# Altium footprint library FootPrintLib_10.PcbLib: 270 footprints (part 5 of 17)
Each footprint in its own frame and in the unit in brackets; x right, y up, seen from the top. Pads: shape width x height; smd on the part's side, far side on the other; paste and mask are expansions set on the pad; w line width, h text height; cw(c..) or ccw(c..) is an arc to the next point about the centre after c.
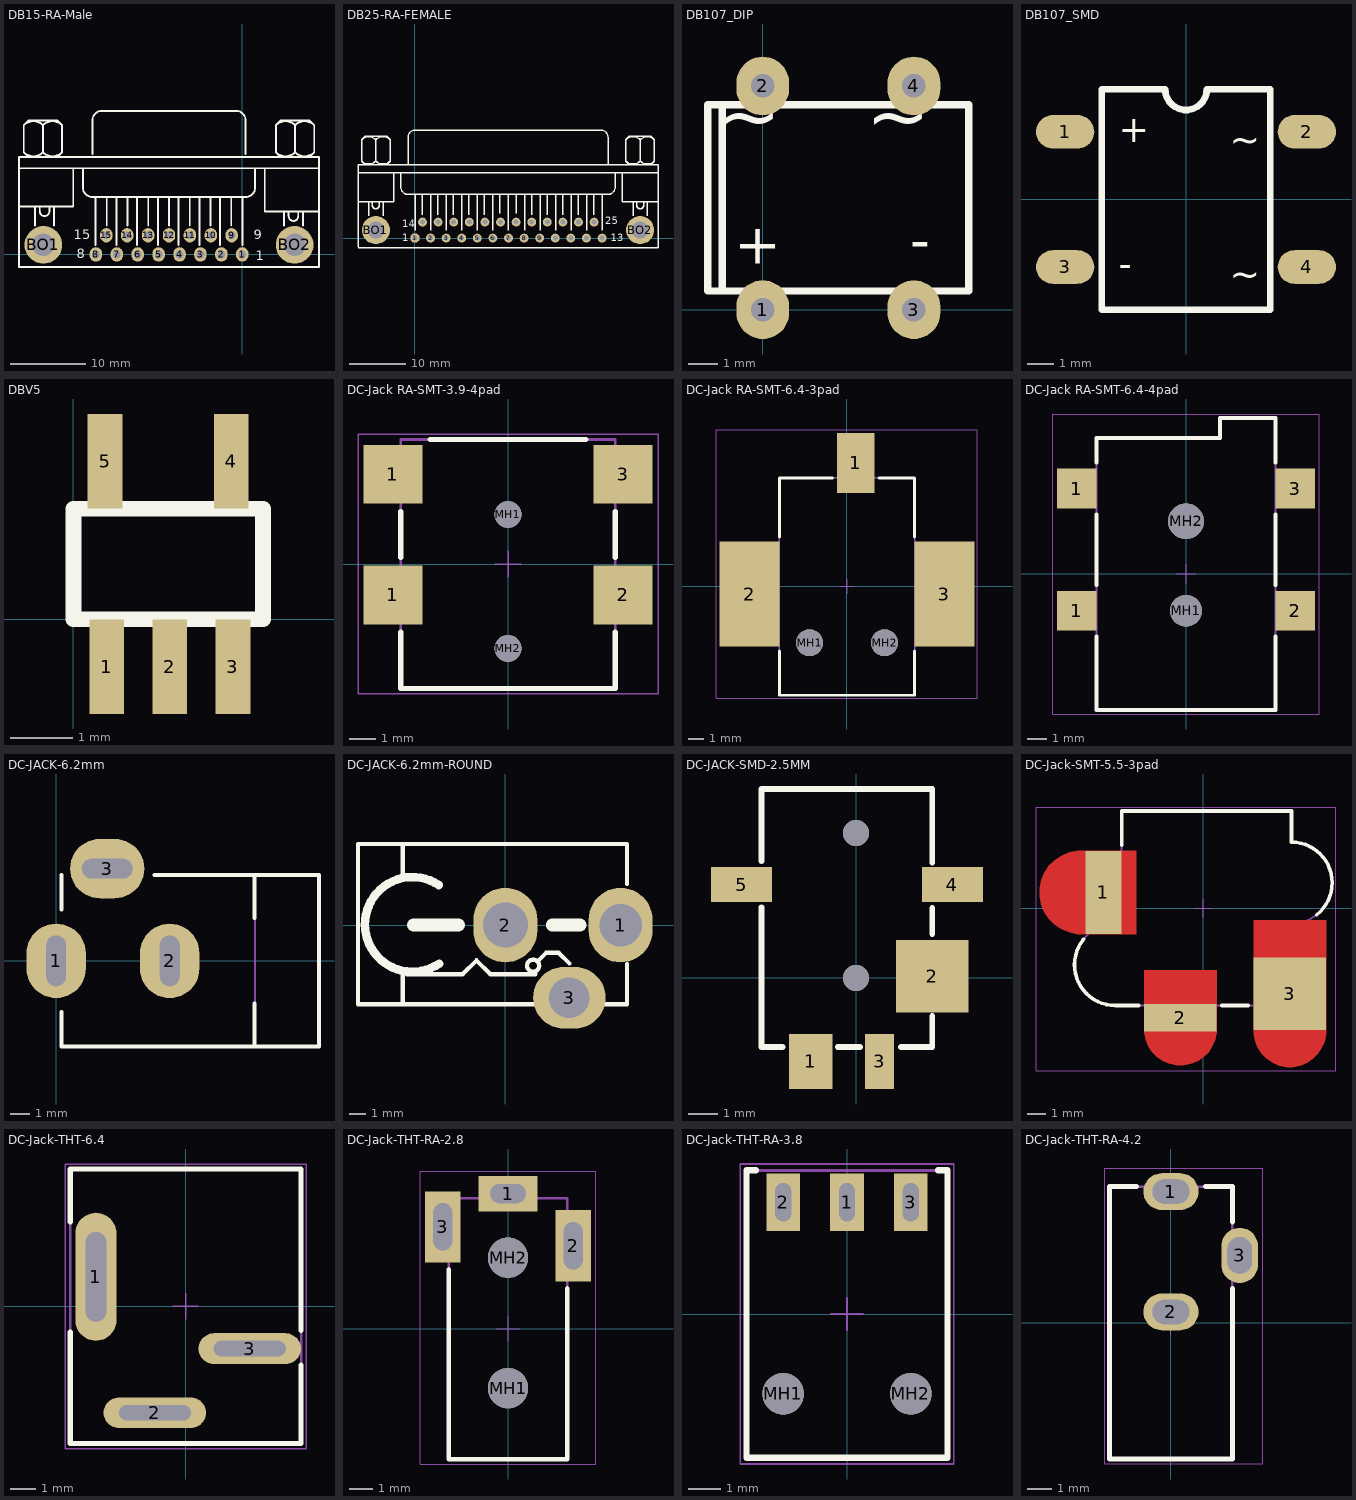
[diagram p4: the footprints below, top view; thin cyan lines are the x and y axes]

## DB15-RA-Male [mil]
pads (17):
  oval 65x75 hole 40: 1(0,0) 2(-109.17,0) 3(-218.33,0) 4(-327.5,0) 5(-436.67,0) 6(-545.83,0) 7(-655,0) 8(-764.17,0) 9(-55,100) 10(-164.17,100) 11(-273.33,100) 12(-382.5,100) 13(-491.67,100) 14(-600.83,100) 15(-710,100)
  round 196.67 hole 118.33: BO1(-1038.33,50) BO2(273.33,50)
Top Overlay:
  lines w10: -1165.83,450 400.83,450 ; -1157.5,250 -882.5,250 -882.5,450 ; -1140.92,533.25 ccw(c-1090.83,583.33) -1040.75,533.25 ; -1140.92,675.09 cw(c-1090.83,625) -1040.75,675.09 ; -1115.83,508.33 -1140.83,533.33 -1140.83,675 -1115.83,700 -965.83,700 -940.83,675 -940.83,533.33 -965.83,508.33 ; -1082.5,150 -1082.5,250 ; -1057.5,250 -1057.5,225 ccw(c-1032.5,225) -1007.5,225 -1007.5,250 ; -1040.92,533.25 ccw(c-990.83,583.33) -940.75,533.25 ; -1040.92,675.09 cw(c-990.83,625) -940.75,675.09 ; -1040.83,533.33 -1040.83,675 ; -982.5,150 -982.5,250 ; -832.5,450 -832.5,350 ccw(c-782.5,350) -782.5,300 17.5,300 ccw(c17.5,350) 67.5,350 67.5,450 ; -782.5,525 -782.5,700 cw(c-732.5,700) -732.5,750 -32.5,750 cw(c-32.5,700) 17.5,700 17.5,525 ; -765.83,50 -765.83,300 ; -707.5,150 -707.5,300 ; -657.5,50 -657.5,300 ; -599.17,150 -599.17,300 ; -549.17,50 -549.17,300 ; -490.83,150 -490.83,300 ; -440.83,50 -440.83,300 ; -382.5,150 -382.5,300 ; -332.5,50 -332.5,300 ; -274.17,150 -274.17,300 ; -224.17,50 -224.17,300 ; -165.83,150 -165.83,300 ; -115.83,50 -115.83,300 ; -57.5,150 -57.5,300 ; 0.83,50 0.83,291.67 ; 117.5,450 117.5,225 392.5,225 ; 175.75,533.25 ccw(c225.83,583.33) 275.92,533.25 ; 175.75,675.09 cw(c225.83,625) 275.92,675.09 ; 200.83,508.33 175.83,533.33 175.83,675 200.83,700 350.83,700 375.83,675 375.83,533.33 350.83,508.33 ; 217.5,150 217.5,225 ; 242.5,225 242.5,200 ccw(c267.5,200) 292.5,200 292.5,225 ; 275.75,533.25 ccw(c325.83,583.33) 375.92,533.25 ; 275.75,675.09 cw(c325.83,625) 375.92,675.09 ; 275.83,533.33 275.83,675 ; 317.5,150 317.5,225 ; -1165.83,-66.67 400.83,-66.67 400.83,508.33 -1165.83,508.33 -1165.83,-66.67
  text "1" at 70,-30 h50
  text "9" at 60,80 h50
  text "15" at -880,80 h50
  text "8" at -865,-20 h50

## DB25-RA-FEMALE [mil]
pads (27):
  oct 62x62 hole 35: 1(0,0)
  round 62 hole 35: 2(109.17,0) 3(218.33,0) 4(327.5,0) 5(436.67,0) 6(545.83,0) 7(655,0) 8(764.17,0) 9(873.33,0) 10(982.5,0) 11(1091.67,0) 12(1200.83,0) 13(1310,0) 14(53.33,111.67) 15(162.5,111.67) 16(271.67,111.67) 17(380.83,111.67) 18(490,111.67) 19(599.17,111.67) 20(708.33,111.67) 21(817.5,111.67) 22(926.67,111.67) 23(1035.83,111.67) 24(1145,111.67) 25(1254.17,111.67)
  round 196.67 hole 118.33: BO1(-273.33,55.83) BO2(1576.67,55.83)
Top Overlay:
  lines w10: -398.33,-69.17 1701.67,-69.17 1701.67,514.17 -398.33,514.17 -398.33,-60.83 ; -398.33,255.83 -148.33,255.83 -148.33,455.83 ; -398.33,455.83 1701.67,455.83 ; -373.42,539.08 ccw(c-323.33,589.17) -273.25,539.08 ; -373.42,689.25 cw(c-323.33,639.17) -273.25,689.25 ; -348.33,514.17 -373.33,539.17 -373.33,689.17 -348.33,714.17 -198.33,714.17 -173.33,689.17 -173.33,539.17 -198.33,514.17 ; -323.33,155.83 -323.33,255.83 ; -298.33,255.83 -298.33,230.83 ccw(c-273.33,230.83) -248.33,230.83 -248.33,255.83 ; -273.42,539.08 ccw(c-223.33,589.17) -173.25,539.08 ; -273.42,689.25 cw(c-223.33,639.17) -173.25,689.25 ; -273.33,539.17 -273.33,689.17 ; -223.33,155.83 -223.33,255.83 ; -98.33,455.83 -98.33,355.83 ccw(c-48.33,355.83) -48.33,305.83 1351.67,305.83 ccw(c1351.67,355.83) 1401.67,355.83 1401.67,455.83 ; -48.33,514.17 -48.33,705.83 cw(c1.67,705.83) 1.67,755.83 1276.67,755.83 1301.67,755.83 cw(c1301.67,705.83) 1351.67,705.83 1351.67,514.17 ; 1.67,55.83 1.67,305.83 ; 51.67,164.17 51.67,305.83 ; 110,55.83 110,305.83 ; 160,164.17 160,305.83 ; 218.33,55.83 218.33,305.83 ; 268.33,164.17 268.33,305.83 ; 326.67,55.83 326.67,305.83 ; 376.67,164.17 376.67,305.83 ; 435,55.83 435,305.83 ; 485,164.17 485,305.83 ; 543.33,55.83 543.33,305.83 ; 593.33,172.5 593.33,305.83 ; 651.67,55.83 651.67,305.83 ; 710,172.5 710,305.83 ; 768.33,55.83 768.33,305.83 ; 818.33,164.17 818.33,305.83 ; 876.67,55.83 876.67,305.83 ; 926.67,164.17 926.67,305.83 ; 985,55.83 985,305.83 ; 1035,164.17 1035,305.83 ; 1093.33,55.83 1093.33,305.83 ; 1143.33,164.17 1143.33,305.83 ; 1201.67,55.83 1201.67,305.83 ; 1251.67,164.17 1251.67,305.83 ; 1310,55.83 1310,305.83 ; 1451.67,455.83 1451.67,255.83 1701.67,255.83 ; 1476.58,539.08 ccw(c1526.67,589.17) 1576.75,539.08 ; 1476.58,689.25 cw(c1526.67,639.17) 1576.75,689.25 ; 1501.67,514.17 1476.67,539.17 1476.67,689.17 1501.67,714.17 1651.67,714.17 1676.67,689.17 1676.67,539.17 1651.67,514.17 ; 1526.67,155.83 1526.67,255.83 ; 1551.67,255.83 1551.67,230.83 ccw(c1576.67,230.83) 1601.67,230.83 1601.67,255.83 ; 1576.58,539.08 ccw(c1626.67,589.17) 1676.75,539.08 ; 1576.58,689.25 cw(c1626.67,639.17) 1676.75,689.25 ; 1576.67,539.17 1576.67,689.17 ; 1626.67,155.83 1626.67,255.83
  text "14" at -88.33,75.83 h50
  text "1" at -88.33,-24.17 h50
  text "13" at 1371.67,-24.17 h50
  text "25" at 1331.67,95.83 h50

## DB107_DIP [mm]
pads (4):
  oval 1.8x2 hole 0.8: 1(0,0) 2(0,7.62) 3(5.15,0) 4(5.15,7.62)
Top Overlay:
  lines w0.254: -1.385,0.635 -1.385,6.985 ; -1.87,0.635 -1.87,6.985 7.02,6.985 7.02,0.635 -1.87,0.635
  text "~" at 5.705,7.315 h1.91
  text "~" at 0.625,7.315 h1.91
  text "-" at 5.714,2.743 h1.4
  text "+" at 0.634,2.743 h1.4

## DB107_SMD [mm] "Bridge Rectifier"
height 2.55
pads (4):
  oval 2.2x1.27 smd: 1(-4.56,2.55) 2(4.56,2.55) 3(-4.56,-2.55) 4(4.56,-2.55)
Top Overlay:
  lines w0.254: -3.175,-4.16 3.175,-4.16 3.175,4.16 0.786,4.16 cw(c0,4.16) -0.786,4.16 -3.175,4.16 -3.175,-4.16
  text "+" at -2.54,2.159 h1
  text "-" at -2.54,-2.921 h1
  text "~" at 1.651,-3.302 h1
  text "~" at 1.651,1.778 h1

## DBV5 [mil]
pads (5):
  rect 22x60 smd: 1(21,-30) 2(61,-30) 3(101,-30) 4(100,100) 5(20,100)
Top Overlay:
  lines w10: 0,0 0,70 120,70 120,0 0,0

## DC-Jack RA-SMT-3.9-4pad [mm] "DC Power Jack Right Angled Low Profile SMT 3.9"
height 5.3
pads (6):
  rect 2.2x2.2 smd: 1(-4.3,-1.15) 1(-4.3,3.35) 2(4.3,-1.15) 3(4.3,3.35)
  round 1 hole 1 unplated: MH1(0,1.85) MH2(0,-3.15)
Top Overlay:
  lines w0.2: -4,-2.55 -4,-4.65 4,-4.65 4,-2.55 ; -4,0.25 -4,1.95 ; -2.9,4.65 2.9,4.65 ; 4,0.25 4,1.95
Mechanical 13:
  lines w0.1: -4,-1.95 -4.9,-1.95 -4.9,-0.35 -4,-0.35 ; -4,2.55 -4.9,2.55 -4.9,4.15 -4,4.15 ; 4,-1.95 4.9,-1.95 4.9,-0.35 4,-0.35 ; 4,2.55 4.9,2.55 4.9,4.15 4,4.15 ; -4,-4.65 4,-4.65 4,4.65 -4,4.65 -4,-4.65
Mechanical 15:
  lines w0.05: -0.5,0 0.5,0 ; 0,-0.5 0,0.5 ; -5.6,-4.85 5.6,-4.85 5.6,4.85 -5.6,4.85 -5.6,-4.85
3D body "694102107102.stp": height 5.32, standoff -0.78, extent -4.9,-4.65 4.9,4.65

## DC-Jack RA-SMT-6.4-3pad [mm] "DC Power Jack Right Angled SMT 6.4 with 3 soldering pad"
height 11
pads (5):
  rect 2.5x4 smd: 1(0.6,8.25)
  rect 4x7 smd: 2(-6.5,-0.5) 3(6.5,-0.5)
  round 1.8 hole 1.8 unplated: MH1(-2.5,-3.75) MH2(2.5,-3.75)
Top Overlay:
  lines w0.2: -4.5,-4.3 -4.5,-7.25 4.5,-7.25 4.5,-4.3 ; -4.5,3.3 -4.5,7.25 -0.95,7.25 ; 2.15,7.25 4.5,7.25 4.5,3.3
Mechanical 13:
  lines w0.1: -4.5,-2.8 -7.6,-2.8 -7.6,1.8 -4.5,1.8 ; -0.3,7.25 -0.3,9.75 1.5,9.75 1.5,7.25 ; 4.5,-2.8 7.6,-2.8 7.6,1.8 4.5,1.8 ; -4.5,-7.25 -4.5,7.25 4.5,7.25 4.5,-7.25 -4.5,-7.25
Mechanical 15:
  lines w0.05: -0.5,0 0.5,0 ; 0,-0.5 0,0.5 ; -8.7,-7.45 -8.7,10.45 8.7,10.45 8.7,-7.45 -8.7,-7.45
3D body "694106105102.stp": height 11.05, standoff -1.95, extent -7.6,-7.25 7.6,9.75

## DC-Jack RA-SMT-6.4-4pad [mm] "DC Power Jack Right Angled SMT ?6.4 with 4 soldering pads & pegs"
height 11
pads (6):
  rect 2x2 smd: 1(-5.5,-1.85) 1(-5.5,4.3) 2(5.5,-1.85) 3(5.5,4.3)
  round 1.6 hole 1.6 unplated: MH1(0,-1.85)
  round 1.8 hole 1.8 unplated: MH2(0,2.65)
Top Overlay:
  lines w0.2: -4.5,-3.15 -4.5,-6.85 4.5,-6.85 4.5,-3.15 ; -4.5,-0.55 -4.5,3 ; -4.5,5.6 -4.5,6.85 1.7,6.85 1.7,7.85 4.5,7.85 4.5,5.6 ; 4.5,-0.55 4.5,3
Mechanical 13:
  lines w0.1: -4.5,-2.6 -6.25,-2.6 -6.25,-1.1 -4.5,-1.1 ; -4.5,3.55 -6.25,3.55 -6.25,5.05 -4.5,5.05 ; 4.5,-2.6 6.25,-2.6 6.25,-1.1 4.5,-1.1 ; 4.5,3.55 6.25,3.55 6.25,5.05 4.5,5.05 ; -4.5,-6.85 -4.5,6.85 1.7,6.85 1.7,7.85 4.5,7.85 4.5,-6.85 -4.5,-6.85
Mechanical 15:
  lines w0.05: -0.5,0 0.5,0 ; 0,-0.5 0,0.5 ; -6.7,-7.05 -6.7,8.05 6.7,8.05 6.7,-7.05 -6.7,-7.05
3D body "694106106102.stp": height 11.05, standoff -1.15, extent -6.25,-6.85 6.25,7.85

## DC-JACK-6.2mm [mil] "DC-JACK-6.2mm"
pads (3):
  oval 120x150 hole 39.37 slot 102 at 90 deg: 1(0,0) 2(229,0)
  oval 150x120 hole 39.37 slot 102 at 0 deg: 3(103,186)
Top Overlay:
  lines w8: 11,-103 11,-173 530,-173 530,173 198,173 ; 11,103 11,173 ; 400,-173 400,-86.5 ; 400,86.5 400,173
Mechanical 13:
  lines w3.94: 401,-173 401,173
  text "PCB Edge" at 420,-145 h9.84
3D body "User Library-DC-JACK-2.5mm-10A.step": height 452.76, standoff -118.11, extent -25.75,-177.16 529.37,200.79

## DC-JACK-6.2mm-ROUND [mil] "µçÔ´²å¿×"
height 393.7
pads (3):
  oval 150x175 hole 100: 1(270,0)
  oval 150x175 hole 105: 2(0,0)
  oval 170x145 hole 95: 3(150,-170)
Top Overlay:
  circle w10: c65,-95 r14.14
  lines w10: -240,-185 -240,-110 ; -240,120 -240,190 ; -230,-115 -100,-115 -67.5,-82.5 -35,-115 70,-115 ; 75,-85 95,-65 125,-65 150,-90 ; 285,-91.25 285,-185 -345,-185 -345,190 285,190 285,96.25
  lines w20: -156.11,94 ccw(c-217.69,1.62) -155,-90
  lines w30: -215,0 -110,0 ; 110,0 175,0
3D body: height 236.22, standoff 0, extent -350,-185 285,190
3D body: height 392.46, standoff 78.74, extent -340.28,-160 250.28,154.34
3D body: height 433.07, standoff 0, extent -350,-185 -235,190

## DC-JACK-SMD-2.5MM [mm] "DC-JACK-SMD-2.5MM"
height 3
pads (5):
  rect 1.5x1.9 smd: 1(-1.565,-2.885)
  rect 2.5x2.5 smd: 2(2.625,0.065)
  rect 1x1.9 smd: 3(0.805,-2.885)
  rect 2.1x1.2 smd: 4(3.321,3.225) 5(-3.956,3.225)
via 0,5 diameter 0.9 hole 0.9
via 0,0 diameter 0.9 hole 0.9
Top Overlay:
  lines w0.203: -3.275,2.44 -3.275,-2.385 -2.54,-2.385 ; -3.275,4.037 -3.275,6.525 2.625,6.525 2.625,3.979 ; -0.635,-2.385 0.127,-2.385 ; 1.552,-2.385 2.625,-2.385 2.625,-1.312 ; 2.625,1.524 2.625,2.413
3D body: height 2, standoff 0, extent 2.667,-0.508 2.921,0.762
3D body: height 0.2, standoff 0, extent 2.921,-0.508 3.556,0.762
3D body: height 2, standoff 0, extent -3.556,2.794 -3.302,3.81
3D body: height 0.2, standoff 0, extent -4.191,2.794 -3.556,3.81
3D body: height 2, standoff 0, extent 2.667,2.794 2.921,3.81
3D body: height 0.2, standoff 0, extent 2.921,2.794 3.556,3.81
3D body: height 2, standoff 0, extent 0.305,-2.667 1.321,-2.413
3D body: height 0.2, standoff 0, extent 0.305,-3.302 1.321,-2.667
3D body: height 0.2, standoff 0, extent -1.905,-3.302 -0.889,-2.667
3D body: height 2, standoff 0, extent -1.905,-2.667 -0.889,-2.413
3D body: height 3, standoff 0, extent -3.302,-2.413 2.667,6.477
3D body: height 2.5, standoff 0, extent -2.764,6.504 -0.274,6.554
3D body: height 1.45, standoff 1.05, extent -1.749,6.502 -1.35,6.602

## DC-Jack-SMT-5.5-3pad [mm] "DC Power Jack Connector Vertical SMT 5.5 with 3 Solder Pads"
height 11
pads (3):
  rect 2x4.6 smd paste-403.566 mask-403.566: 1(-5.5,0.875)
  rect 4x1.5 smd paste-403.566 mask-403.566: 2(-1.25,-6.05)
  rect 4x4 smd paste-403.566 mask-403.566: 3(4.8,-4.725)
Top Layer:
  region: 2.8,-6.775 2.8,-0.675 6.8,-0.675 6.8,-6.775 6.8,-6.972 6.723,-7.358 6.572,-7.722 6.354,-8.05 6.075,-8.328 5.747,-8.547 5.383,-8.698 4.997,-8.775 4.603,-8.775 4.217,-8.698 3.853,-8.547 3.525,-8.328 3.246,-8.05 3.028,-7.722 2.877,-7.358 2.8,-6.972
  region: -3.25,-6.675 -3.25,-6.872 -3.173,-7.258 -3.022,-7.622 -2.804,-7.95 -2.525,-8.229 -2.197,-8.447 -1.833,-8.598 -1.447,-8.675 -1.053,-8.675 -0.667,-8.598 -0.303,-8.447 0.025,-8.229 0.304,-7.95 0.522,-7.622 0.673,-7.258 0.75,-6.872 0.75,-6.675 0.75,-3.425 -3.25,-3.425
  region: -6.73,-1.425 -6.957,-1.425 -7.401,-1.337 -7.819,-1.163 -8.196,-0.912 -8.517,-0.591 -8.768,-0.214 -8.942,0.204 -9.03,0.648 -9.03,1.102 -8.942,1.546 -8.768,1.964 -8.517,2.341 -8.196,2.662 -7.819,2.913 -7.401,3.087 -6.957,3.175 -6.73,3.175 -3.7,3.175 -3.7,-1.425
Top Overlay:
  lines w0.2: -6.607,-1.719 ccw(c-4.85,-3.125) -4.85,-5.375 -3.55,-5.375 ; -4.5,3.475 -4.5,5.375 4.888,5.375 4.888,3.655 cw(c4.888,1.405) 6.286,-0.358 ; 1.05,-5.375 2.5,-5.375
Mechanical 13:
  lines w0.1: -4.5,-0.902 ccw(c-4.85,-3.125) -4.85,-5.375 4.888,-5.375 4.888,-0.845 ccw(c4.888,1.405) 4.888,3.655 4.888,5.375 -4.5,5.375 -4.5,-0.9
Mechanical 15:
  lines w0.05: -0.5,0 0.5,0 ; 0,-0.5 0,0.5 ; -9.23,-8.975 7.35,-8.975 7.35,5.575 -9.23,5.575 -9.23,-8.975
3D body "694106210102.stp": height 14.05, standoff 0.05, extent -8.35,-8.225 7.138,5.375

## DC-Jack-THT-6.4 [mm] "DC Power Jack Vertical THT ?6.4"
height 14
pads (3):
  oval 1.6x5 hole 0.8 slot 3.5 at 90 deg: 1(-3.5,1.15)
  oval 4x1.2 hole 0.6 slot 2.8 at 0 deg: 2(-1.2,-4.15) 3(2.5,-1.65)
Top Overlay:
  lines w0.2: -4.5,-1 -4.5,-5.35 4.5,-5.35 4.5,-2.3 ; -4.5,3.3 -4.5,5.35 4.5,5.35 4.5,-0.95
Mechanical 13:
  lines w0.1: -4.5,-5.35 4.5,-5.35 4.5,5.35 ; -4.5,-5.35 -4.5,5.35 4.5,5.35
Mechanical 15:
  lines w0.05: -0.5,0 0.5,0 ; 0,-0.5 0,0.5 ; -4.7,-5.55 4.7,-5.55 4.7,5.55 -4.7,5.55 -4.7,-5.55
3D body "694106402002.stp": height 14.1, standoff -3.5, extent -4.5,-5.35 4.5,5.35

## DC-Jack-THT-RA-2.8 [mm] "DC Power Jack THT Right Angled Low Profile(2.8)"
height 5
pads (5):
  rect 2.5x1.5 hole 0.8 slot 1.5 at 0 deg: 1(0,5.7)
  rect 1.5x3 hole 0.8 slot 2 at 90 deg: 2(2.75,3.5) 3(-2.75,4.3)
  round 1.7 hole 1.7 unplated: MH1(0,-2.5) MH2(0,3)
Top Overlay:
  lines w0.2: -2.5,2.5 -2.5,-5.5 2.5,-5.5 2.5,1.7
Mechanical 13:
  lines w0.1: -2.5,-5.5 -2.5,5.5 2.5,5.5 2.5,-5.5 -2.5,-5.5
Mechanical 15:
  lines w0.05: -0.5,0 0.5,0 ; 0,-0.5 0,0.5 ; -3.7,-5.7 -3.7,6.65 3.7,6.65 3.7,-5.7 -3.7,-5.7
3D body "694101308002.stp": height 5.05, standoff -2.25, extent -2.9,-5.5 2.9,6.5

## DC-Jack-THT-RA-3.8 [mm] "DC Power Jack THT Right Angled Low Profile(3.8)"
height 5
pads (5):
  rect 1.05x1.8 hole 0.5 slot 1.2 at 90 deg: 1(0,3.5) 2(-2,3.5) 3(2,3.5)
  round 1.3 hole 1.3 unplated: MH1(-2,-2.5) MH2(2,-2.5)
Top Overlay:
  lines w0.2: -2.85,4.5 -3.15,4.5 -3.15,-4.5 3.15,-4.5 3.15,4.5 ; 2.85,4.5 3.15,4.5 ; 3.15,4.5 3.15,4.5
Mechanical 13:
  lines w0.1: -3.15,-4.5 -3.15,4.5 3.15,4.5 3.15,-4.5 -3.15,-4.5
Mechanical 15:
  lines w0.05: -0.5,0 0.5,0 ; 0,-0.5 0,0.5 ; -3.35,-4.7 3.35,-4.7 3.35,4.7 -3.35,4.7 -3.35,-4.7
3D body "694102304002.stp": height 5.1, standoff -2.95, extent -3.15,-4.5 3.15,4.5

## DC-Jack-THT-RA-4.2 [mm] "DC Power Jack Right Angled(4.2)"
height 7.4
pads (3):
  oval 2.25x1.5 hole 1 slot 1.5 at 0 deg: 1(0,5.35) 2(0,0.45)
  oval 1.5x2.25 hole 1 slot 1.5 at 90 deg: 3(2.8,2.75)
Top Overlay:
  lines w0.2: -1.4,5.55 -2.5,5.55 -2.5,-5.55 2.5,-5.55 2.5,1.4 ; 1.4,5.55 2.5,5.55 2.5,4.1
Mechanical 13:
  lines w0.1: -2.5,-5.55 2.5,-5.55 2.5,5.55 -2.5,5.55 -2.5,-5.55
Mechanical 15:
  lines w0.05: -0.5,0 0.5,0 ; 0,-0.5 0,0.5 ; -2.7,-5.75 -2.7,6.3 3.75,6.3 3.75,-5.75 -2.7,-5.75
3D body "694102303002.stp": height 7.8, standoff -2.6, extent -2.5,-5.55 3,5.75